# Altium integrated library MMBT3904_RFG.IntLib: 1 symbol
Pins are listed as number, name and electrical type; pins without a type are passive.

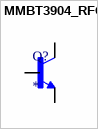
[diagram p0: symbol MMBT3904_RFG]

## MMBT3904_RFG
designator Q?
SOT-23, 60V, 0.2A, NPN Transistor; MF: Taiwan Semiconductor; MP: MMBT3904 RFG; SnapEDA_Link: https://www.snapeda.com/parts/MMBT3904%20RFG/taiwan/view-part/?ref=snap; Package: SOT-23-3 Taiwan Semiconductor; Value: *; Check_prices: https://www.snapeda.com/parts/MMBT3904%20RFG/taiwan/view-part/?ref=eda
footprint SOT95P237X112-3N
pins: 1 B, 2 E, 3 C